# Altium footprint library SamacSys.PcbLib: 1008 footprints (part 51 of 63)
Each footprint in its own frame and in the unit in brackets; x right, y up, seen from the top. Pads: shape width x height; smd on the part's side, far side on the other; paste and mask are expansions set on the pad; w line width, h text height; cw(c..) or ccw(c..) is an arc to the next point about the centre after c.
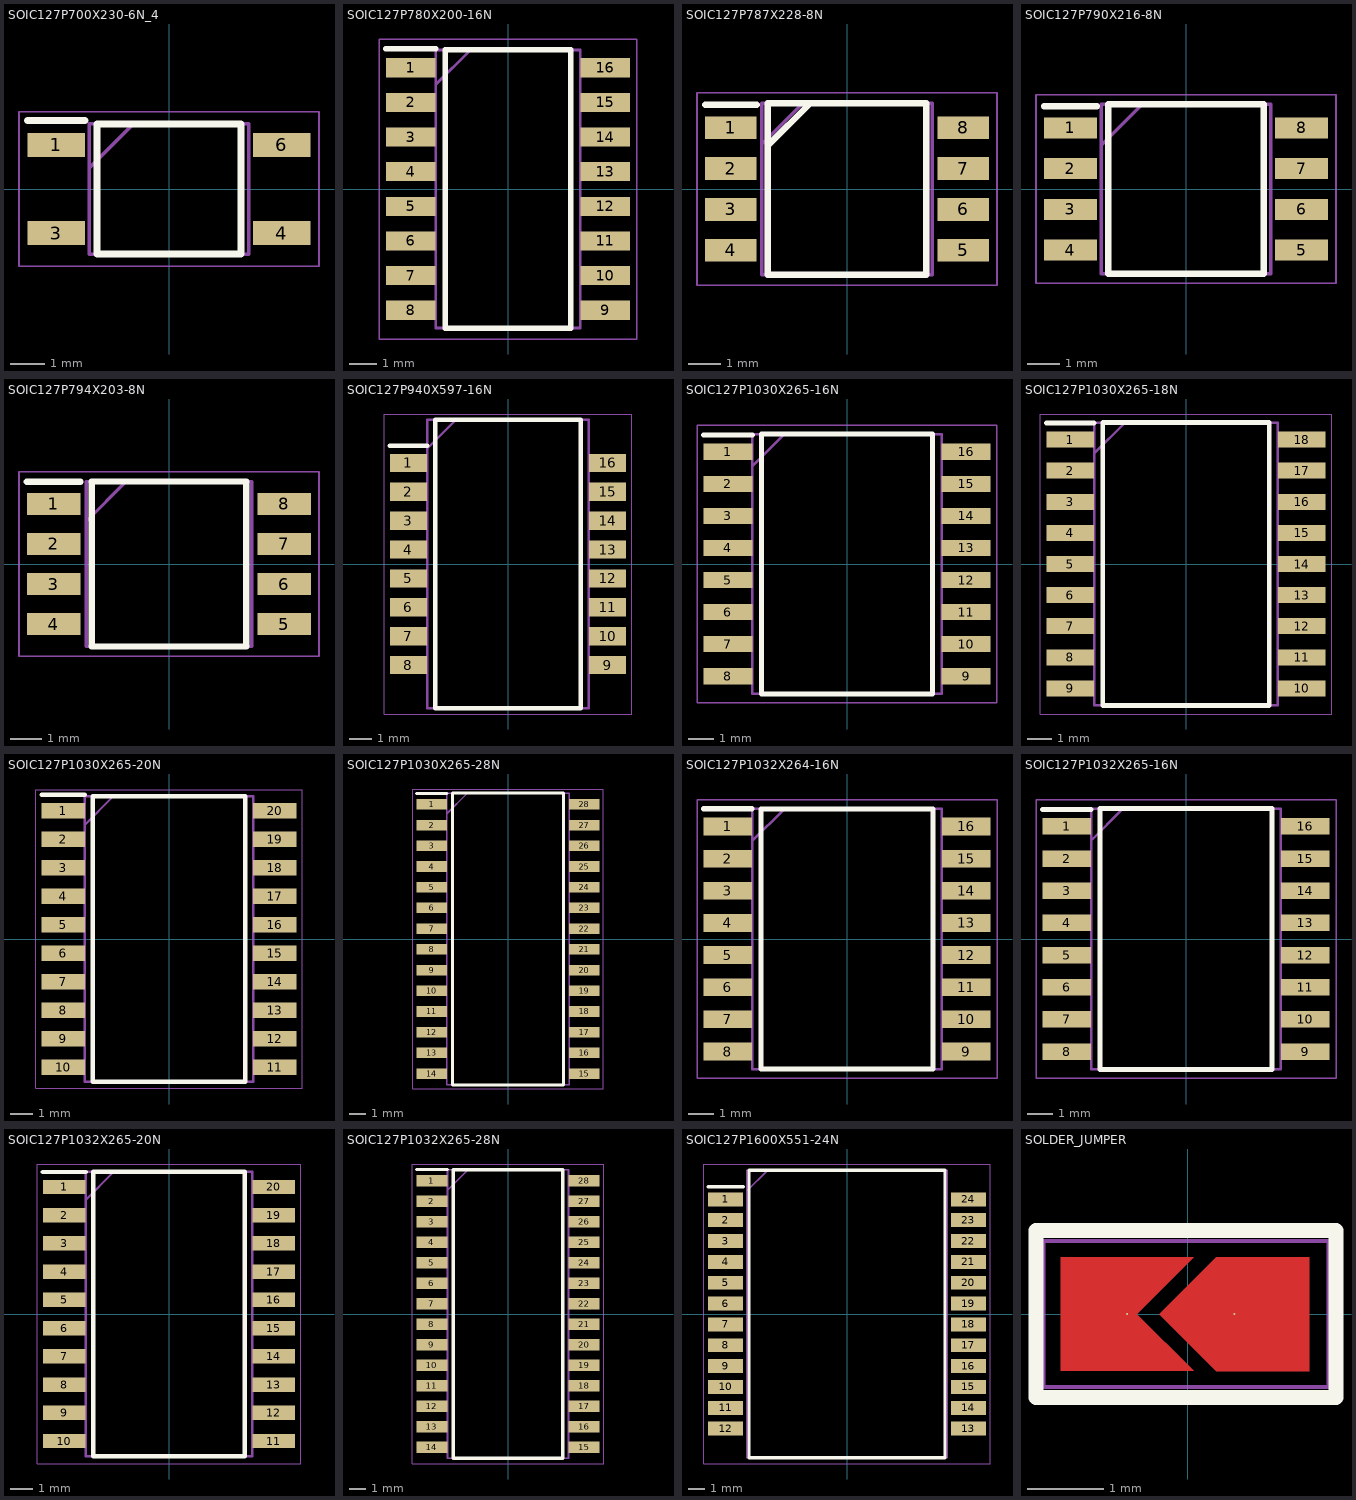
[diagram p50: the footprints below, top view; thin cyan lines are the x and y axes]

## SOIC127P700X230-6N_4 [mm]
pads (4):
  rect 1.65x0.7 smd: 1(-3.25,1.27) 3(-3.25,-1.27) 4(3.25,-1.27) 6(3.25,1.27)
Top Overlay:
  lines w0.2: -4.075,1.97 -2.425,1.97 ; -2.075,-1.875 -2.075,1.875 2.075,1.875 2.075,-1.875 -2.075,-1.875
Assembly:
  lines w0.1: -2.3,0.605 -1.03,1.875 ; -2.3,-1.875 -2.3,1.875 2.3,1.875 2.3,-1.875 -2.3,-1.875
Countryard:
  lines w0.05: -4.325,-2.225 -4.325,2.225 4.325,2.225 4.325,-2.225 -4.325,-2.225
3D body "TLP185_GB,SE.stp": height 2.3, standoff 0, extent -3.5,-1.875 3.5,1.875

## SOIC127P780X200-16N [mm]
pads (16):
  rect 1.825x0.7 smd: 1(-3.562,4.445) 2(-3.562,3.175) 3(-3.562,1.905) 4(-3.562,0.635) 5(-3.562,-0.635) 6(-3.562,-1.905) 7(-3.562,-3.175) 8(-3.562,-4.445) 9(3.562,-4.445) 10(3.562,-3.175) 11(3.562,-1.905) 12(3.562,-0.635) 13(3.562,0.635) 14(3.562,1.905) 15(3.562,3.175) 16(3.562,4.445)
Top Overlay:
  lines w0.2: -4.475,5.145 -2.65,5.145 ; -2.3,-5.1 2.3,-5.1 2.3,5.1 -2.3,5.1 -2.3,-5.1
Assembly:
  lines w0.1: -2.65,3.83 -1.38,5.1 ; -2.65,-5.1 2.65,-5.1 2.65,5.1 -2.65,5.1 -2.65,-5.1
Countryard:
  lines w0.05: -4.725,-5.5 4.725,-5.5 4.725,5.5 -4.725,5.5 -4.725,-5.5
3D body "CD4094BNSR.stp": height 2, standoff 0, extent -3.9,-5.1 3.9,5.1

## SOIC127P787X228-8N [mm]
pads (8):
  rect 1.6x0.7 smd: 1(-3.6,1.905) 2(-3.6,0.635) 3(-3.6,-0.635) 4(-3.6,-1.905) 5(3.6,-1.905) 6(3.6,-0.635) 7(3.6,0.635) 8(3.6,1.905)
Top Overlay:
  lines w0.2: -4.4,2.605 -2.8,2.605 ; -2.4,1.4 -1.2,2.6 ; -2.45,-2.655 -2.45,2.655 2.45,2.655 2.45,-2.655 -2.45,-2.655
Top Assembly:
  lines w0.1: -2.5,1.3 -1.1,2.7 ; -2.5,-2.7 2.5,-2.7 2.5,2.7 -2.5,2.7 -2.5,-2.7
Assembly:
  lines w0.1: -2.642,1.385 -1.372,2.655 ; -2.642,-2.655 -2.642,2.655 2.642,2.655 2.642,-2.655 -2.642,-2.655
Countryard:
  lines w0.05: -4.65,-2.98 -4.65,2.98 4.65,2.98 4.65,-2.98 -4.65,-2.98
3D body "DS1302S+.stp": height 2.28, standoff 0, extent -3.935,-2.655 3.935,2.655

## SOIC127P790X216-8N [mm]
pads (8):
  rect 1.65x0.65 smd: 1(-3.6,1.905) 2(-3.6,0.635) 3(-3.6,-0.635) 4(-3.6,-1.905) 5(3.6,-1.905) 6(3.6,-0.635) 7(3.6,0.635) 8(3.6,1.905)
Top Overlay:
  lines w0.2: -4.425,2.58 -2.775,2.58 ; -2.425,-2.64 -2.425,2.64 2.425,2.64 2.425,-2.64 -2.425,-2.64
Assembly:
  lines w0.1: -2.64,1.37 -1.37,2.64 ; -2.64,-2.64 -2.64,2.64 2.64,2.64 2.64,-2.64 -2.64,-2.64
Countryard:
  lines w0.05: -4.675,-2.94 -4.675,2.94 4.675,2.94 4.675,-2.94 -4.675,-2.94
3D body "W25Q64CVSSIG.stp": height 2.16, standoff 0, extent -3.95,-2.64 3.95,2.64

## SOIC127P794X203-8N [mm]
pads (8):
  rect 1.7x0.7 smd: 1(-3.65,1.905) 2(-3.65,0.635) 3(-3.65,-0.635) 4(-3.65,-1.905) 5(3.65,-1.905) 6(3.65,-0.635) 7(3.65,0.635) 8(3.65,1.905)
Top Overlay:
  lines w0.2: -4.5,2.605 -2.8,2.605 ; -2.45,-2.615 -2.45,2.615 2.45,2.615 2.45,-2.615 -2.45,-2.615
Assembly:
  lines w0.1: -2.622,1.345 -1.352,2.615 ; -2.622,-2.615 -2.622,2.615 2.622,2.615 2.622,-2.615 -2.622,-2.615
Countryard:
  lines w0.05: -4.75,-2.915 -4.75,2.915 4.75,2.915 4.75,-2.915 -4.75,-2.915
3D body "24LC512-E_SM.stp": height 2.03, standoff 0, extent -3.97,-2.615 3.97,2.615

## SOIC127P940X597-16N [mm]
pads (16):
  rect 1.645x0.8 smd: 1(-4.378,4.445) 2(-4.378,3.175) 3(-4.378,1.905) 4(-4.378,0.635) 5(-4.378,-0.635) 6(-4.378,-1.905) 7(-4.378,-3.175) 8(-4.378,-4.445) 9(4.378,-4.445) 10(4.378,-3.175) 11(4.378,-1.905) 12(4.378,-0.635) 13(4.378,0.635) 14(4.378,1.905) 15(4.378,3.175) 16(4.378,4.445)
Top Overlay:
  lines w0.2: -5.2,5.195 -3.555,5.195 ; -3.205,-6.35 3.205,-6.35 3.205,6.35 -3.205,6.35 -3.205,-6.35
Assembly:
  lines w0.1: -3.555,5.08 -2.285,6.35 ; -3.555,-6.35 3.555,-6.35 3.555,6.35 -3.555,6.35 -3.555,-6.35
Countryard:
  lines w0.05: -5.45,-6.6 5.45,-6.6 5.45,6.6 -5.45,6.6 -5.45,-6.6
3D body "H1102NL.stp": height 5.95, standoff 0, extent -4.76,-6.35 4.76,6.35

## SOIC127P1030X265-16N [mm]
pads (16):
  rect 1.95x0.65 smd: 1(-4.725,4.445) 2(-4.725,3.175) 3(-4.725,1.905) 4(-4.725,0.635) 5(-4.725,-0.635) 6(-4.725,-1.905) 7(-4.725,-3.175) 8(-4.725,-4.445) 9(4.725,-4.445) 10(4.725,-3.175) 11(4.725,-1.905) 12(4.725,-0.635) 13(4.725,0.635) 14(4.725,1.905) 15(4.725,3.175) 16(4.725,4.445)
Top Overlay:
  lines w0.2: -5.7,5.12 -3.75,5.12 ; -3.4,-5.15 -3.4,5.15 3.4,5.15 3.4,-5.15 -3.4,-5.15
Assembly:
  lines w0.1: -3.75,3.88 -2.48,5.15 ; -3.75,-5.15 -3.75,5.15 3.75,5.15 3.75,-5.15 -3.75,-5.15
Countryard:
  lines w0.05: -5.95,-5.5 -5.95,5.5 5.95,5.5 5.95,-5.5 -5.95,-5.5
3D body "ISO3082DW.stp": height 2.59, standoff 0, extent -5.167,-5.15 5.167,5.15

## SOIC127P1030X265-18N [mm]
pads (18):
  rect 1.95x0.65 smd: 1(-4.725,5.08) 2(-4.725,3.81) 3(-4.725,2.54) 4(-4.725,1.27) 5(-4.725,0) 6(-4.725,-1.27) 7(-4.725,-2.54) 8(-4.725,-3.81) 9(-4.725,-5.08) 10(4.725,-5.08) 11(4.725,-3.81) 12(4.725,-2.54) 13(4.725,-1.27) 14(4.725,0) 15(4.725,1.27) 16(4.725,2.54) 17(4.725,3.81) 18(4.725,5.08)
Top Overlay:
  lines w0.2: -5.7,5.755 -3.75,5.755 ; -3.4,-5.775 3.4,-5.775 3.4,5.775 -3.4,5.775 -3.4,-5.775
Assembly:
  lines w0.1: -3.75,4.505 -2.48,5.775 ; -3.75,-5.775 3.75,-5.775 3.75,5.775 -3.75,5.775 -3.75,-5.775
Countryard:
  lines w0.05: -5.95,-6.125 5.95,-6.125 5.95,6.125 -5.95,6.125 -5.95,-6.125
3D body "ULN2803ADW.stp": height 2.65, standoff 0, extent -5.15,-5.775 5.15,5.775

## SOIC127P1030X265-20N [mm]
pads (20):
  rect 1.925x0.7 smd: 1(-4.712,5.715) 2(-4.712,4.445) 3(-4.712,3.175) 4(-4.712,1.905) 5(-4.712,0.635) 6(-4.712,-0.635) 7(-4.712,-1.905) 8(-4.712,-3.175) 9(-4.712,-4.445) 10(-4.712,-5.715) 11(4.712,-5.715) 12(4.712,-4.445) 13(4.712,-3.175) 14(4.712,-1.905) 15(4.712,-0.635) 16(4.712,0.635) 17(4.712,1.905) 18(4.712,3.175) 19(4.712,4.445) 20(4.712,5.715)
Top Overlay:
  lines w0.2: -5.675,6.415 -3.75,6.415 ; -3.4,-6.35 -3.4,6.35 3.4,6.35 3.4,-6.35 -3.4,-6.35
Assembly:
  lines w0.1: -3.75,5.08 -2.48,6.35 ; -3.75,-6.35 -3.75,6.35 3.75,6.35 3.75,-6.35 -3.75,-6.35
Countryard:
  lines w0.05: -5.925,-6.65 -5.925,6.65 5.925,6.65 5.925,-6.65 -5.925,-6.65
3D body "BTS716G.stp": height 2.65, standoff 0, extent -5.15,-6.35 5.15,6.35

## SOIC127P1030X265-28N [mm]
pads (28):
  rect 1.85x0.65 smd: 1(-4.675,8.255) 2(-4.675,6.985) 3(-4.675,5.715) 4(-4.675,4.445) 5(-4.675,3.175) 6(-4.675,1.905) 7(-4.675,0.635) 8(-4.675,-0.635) 9(-4.675,-1.905) 10(-4.675,-3.175) 11(-4.675,-4.445) 12(-4.675,-5.715) 13(-4.675,-6.985) 14(-4.675,-8.255) 15(4.675,-8.255) 16(4.675,-6.985) 17(4.675,-5.715) 18(4.675,-4.445) 19(4.675,-3.175) 20(4.675,-1.905) 21(4.675,-0.635) 22(4.675,0.635) 23(4.675,1.905) 24(4.675,3.175) 25(4.675,4.445) 26(4.675,5.715) 27(4.675,6.985) 28(4.675,8.255)
Top Overlay:
  lines w0.2: -5.6,8.93 -3.75,8.93 ; -3.4,-8.95 -3.4,8.95 3.4,8.95 3.4,-8.95 -3.4,-8.95
Assembly:
  lines w0.1: -3.75,7.68 -2.48,8.95 ; -3.75,-8.95 -3.75,8.95 3.75,8.95 3.75,-8.95 -3.75,-8.95
Countryard:
  lines w0.05: -5.85,-9.2 -5.85,9.2 5.85,9.2 5.85,-9.2 -5.85,-9.2
3D body "MCP23017T-E_SO.stp": height 2.65, standoff 0, extent -5.15,-8.95 5.15,8.95

## SOIC127P1032X264-16N [mm]
pads (16):
  rect 1.93x0.7 smd: 1(-4.71,4.445) 2(-4.71,3.175) 3(-4.71,1.905) 4(-4.71,0.635) 5(-4.71,-0.635) 6(-4.71,-1.905) 7(-4.71,-3.175) 8(-4.71,-4.445) 9(4.71,-4.445) 10(4.71,-3.175) 11(4.71,-1.905) 12(4.71,-0.635) 13(4.71,0.635) 14(4.71,1.905) 15(4.71,3.175) 16(4.71,4.445)
Top Overlay:
  lines w0.2: -5.675,5.145 -3.745,5.145 ; -3.395,-5.142 -3.395,5.142 3.395,5.142 3.395,-5.142 -3.395,-5.142
Assembly:
  lines w0.1: -3.745,3.872 -2.475,5.142 ; -3.745,-5.142 -3.745,5.142 3.745,5.142 3.745,-5.142 -3.745,-5.142
Countryard:
  lines w0.05: -5.925,-5.495 -5.925,5.495 5.925,5.495 5.925,-5.495 -5.925,-5.495
3D body "W25N02KVSFIR.stp": height 2.64, standoff 0, extent -5.162,-5.142 5.162,5.142

## SOIC127P1032X265-16N [mm]
pads (16):
  rect 1.925x0.65 smd: 1(-4.712,4.445) 2(-4.712,3.175) 3(-4.712,1.905) 4(-4.712,0.635) 5(-4.712,-0.635) 6(-4.712,-1.905) 7(-4.712,-3.175) 8(-4.712,-4.445) 9(4.712,-4.445) 10(4.712,-3.175) 11(4.712,-1.905) 12(4.712,-0.635) 13(4.712,0.635) 14(4.712,1.905) 15(4.712,3.175) 16(4.712,4.445)
Top Overlay:
  lines w0.2: -5.675,5.12 -3.75,5.12 ; -3.4,-5.15 -3.4,5.15 3.4,5.15 3.4,-5.15 -3.4,-5.15
Assembly:
  lines w0.1: -3.75,3.88 -2.48,5.15 ; -3.75,-5.15 -3.75,5.15 3.75,5.15 3.75,-5.15 -3.75,-5.15
Countryard:
  lines w0.05: -5.925,-5.5 -5.925,5.5 5.925,5.5 5.925,-5.5 -5.925,-5.5
3D body "MAX232CWE+.stp": height 2.65, standoff 0, extent -5.162,-5.15 5.162,5.15

## SOIC127P1032X265-20N [mm]
pads (20):
  rect 1.925x0.65 smd: 1(-4.712,5.715) 2(-4.712,4.445) 3(-4.712,3.175) 4(-4.712,1.905) 5(-4.712,0.635) 6(-4.712,-0.635) 7(-4.712,-1.905) 8(-4.712,-3.175) 9(-4.712,-4.445) 10(-4.712,-5.715) 11(4.712,-5.715) 12(4.712,-4.445) 13(4.712,-3.175) 14(4.712,-1.905) 15(4.712,-0.635) 16(4.712,0.635) 17(4.712,1.905) 18(4.712,3.175) 19(4.712,4.445) 20(4.712,5.715)
Top Overlay:
  lines w0.2: -5.675,6.39 -3.75,6.39 ; -3.4,-6.4 -3.4,6.4 3.4,6.4 3.4,-6.4 -3.4,-6.4
Assembly:
  lines w0.1: -3.75,5.13 -2.48,6.4 ; -3.75,-6.4 -3.75,6.4 3.75,6.4 3.75,-6.4 -3.75,-6.4
Countryard:
  lines w0.05: -5.925,-6.75 -5.925,6.75 5.925,6.75 5.925,-6.75 -5.925,-6.75
3D body "ADM2582EBRWZ.stp": height 2.65, standoff 0, extent -5.162,-6.4 5.162,6.4

## SOIC127P1032X265-28N [mm]
pads (28):
  rect 1.925x0.7 smd: 1(-4.712,8.255) 2(-4.712,6.985) 3(-4.712,5.715) 4(-4.712,4.445) 5(-4.712,3.175) 6(-4.712,1.905) 7(-4.712,0.635) 8(-4.712,-0.635) 9(-4.712,-1.905) 10(-4.712,-3.175) 11(-4.712,-4.445) 12(-4.712,-5.715) 13(-4.712,-6.985) 14(-4.712,-8.255) 15(4.712,-8.255) 16(4.712,-6.985) 17(4.712,-5.715) 18(4.712,-4.445) 19(4.712,-3.175) 20(4.712,-1.905) 21(4.712,-0.635) 22(4.712,0.635) 23(4.712,1.905) 24(4.712,3.175) 25(4.712,4.445) 26(4.712,5.715) 27(4.712,6.985) 28(4.712,8.255)
Top Overlay:
  lines w0.2: -5.675,8.955 -3.75,8.955 ; -3.4,-8.95 -3.4,8.95 3.4,8.95 3.4,-8.95 -3.4,-8.95
Assembly:
  lines w0.1: -3.75,7.68 -2.48,8.95 ; -3.75,-8.95 -3.75,8.95 3.75,8.95 3.75,-8.95 -3.75,-8.95
Countryard:
  lines w0.05: -5.925,-9.3 -5.925,9.3 5.925,9.3 5.925,-9.3 -5.925,-9.3
3D body "AD9220ARZ.stp": height 2.65, standoff 0, extent -5.162,-8.95 5.162,8.95

## SOIC127P1600X551-24N [mm]
pads (24):
  rect 2.15x0.85 smd: 1(-7.4,6.985) 2(-7.4,5.715) 3(-7.4,4.445) 4(-7.4,3.175) 5(-7.4,1.905) 6(-7.4,0.635) 7(-7.4,-0.635) 8(-7.4,-1.905) 9(-7.4,-3.175) 10(-7.4,-4.445) 11(-7.4,-5.715) 12(-7.4,-6.985) 13(7.4,-6.985) 14(7.4,-5.715) 15(7.4,-4.445) 16(7.4,-3.175) 17(7.4,-1.905) 18(7.4,-0.635) 19(7.4,0.635) 20(7.4,1.905) 21(7.4,3.175) 22(7.4,4.445) 23(7.4,5.715) 24(7.4,6.985)
Top Overlay:
  lines w0.2: -8.475,7.76 -6.325,7.76 ; -5.975,-8.765 -5.975,8.765 5.975,8.765 5.975,-8.765 -5.975,-8.765
Assembly:
  lines w0.1: -6.1,7.495 -4.83,8.765 ; -6.1,-8.765 -6.1,8.765 6.1,8.765 6.1,-8.765 -6.1,-8.765
Countryard:
  lines w0.05: -8.725,-9.14 -8.725,9.14 8.725,9.14 8.725,-9.14 -8.725,-9.14
3D body "H5007NL.stp": height 5.51, standoff 0, extent -8,-8.765 8,8.765

## SOLDER_JUMPER [mil]
pads (2):
  round 1 smd: 1(-31.5,0) 2(24.11,-0.03)
Top Layer:
  region: -14.76,0 14.82,-29.59 62.99,-29.59 62.99,29.53 14.76,29.53
  region: -65.94,-29.53 2.95,-29.53 -26.57,0 2.95,29.53 -65.94,29.53
Top Overlay:
  lines w7.87: -78.74,-43.31 -78.74,43.31 76.77,43.31 76.77,-43.31 -78.74,-43.31
Top Solder:
  rectangle: -69.88,-33.46 66.93,33.46
Assembly:
  lines w3.94: -47.24,-24.61 -47.24,24.61 ; 31.5,-24.61 31.5,24.61
Countryard:
  lines w1.97: -74.8,-37.8 -74.8,37.8 72.83,37.8 72.83,-37.8 -74.8,-37.8